# Altium footprint library SamacSys.PcbLib: 88 footprints (part 4 of 6)
Each footprint in its own frame and in the unit in brackets; x right, y up, seen from the top. Pads: shape width x height; smd on the part's side, far side on the other; paste and mask are expansions set on the pad; w line width, h text height; cw(c..) or ccw(c..) is an arc to the next point about the centre after c.
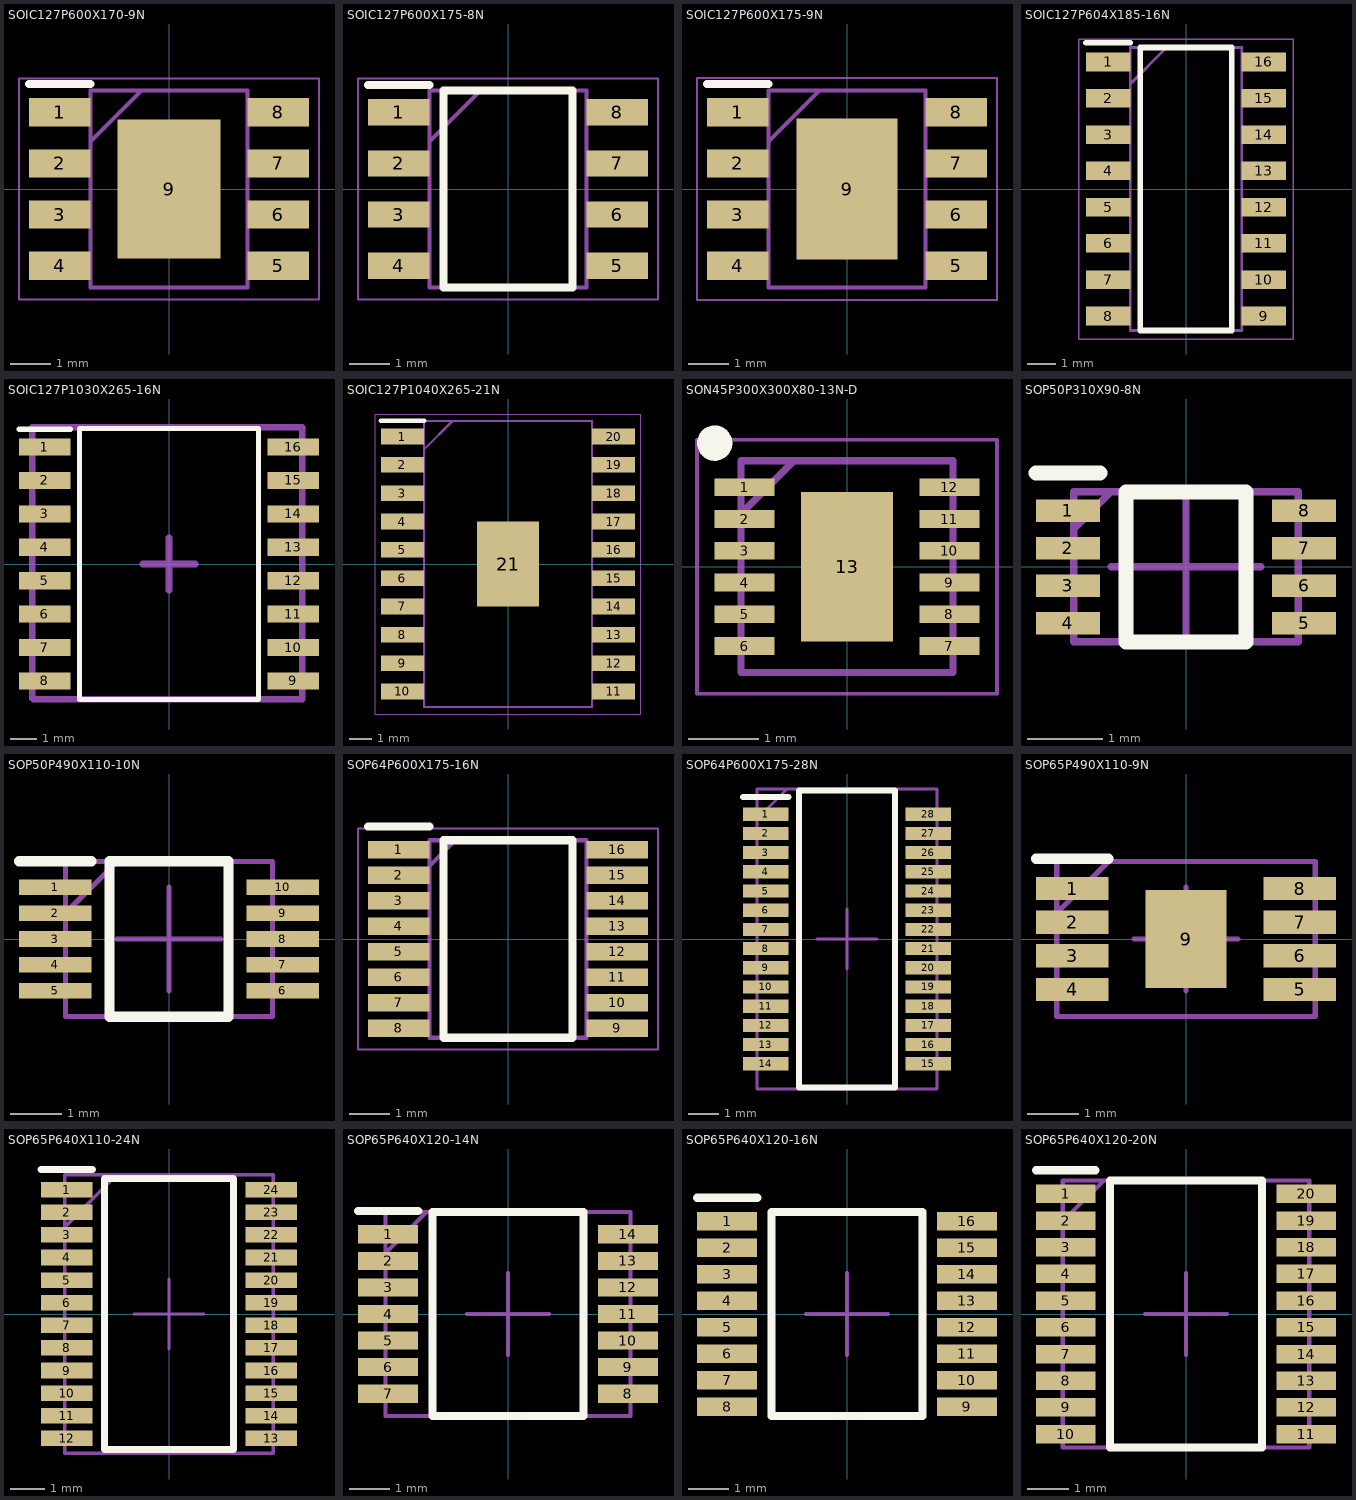
[diagram p3: the footprints below, top view; thin cyan lines are the x and y axes]

## SOIC127P600X170-9N [mm]
pads (9):
  rect 1.525x0.7 smd: 1(-2.712,1.905) 2(-2.712,0.635) 3(-2.712,-0.635) 4(-2.712,-1.905) 5(2.712,-1.905) 6(2.712,-0.635) 7(2.712,0.635) 8(2.712,1.905)
  rect 2.56x3.45 smd: 9(0,0)
Top Overlay:
  lines w0.2: -3.475,2.605 -1.95,2.605
Body Extra:
  lines w0.1: -1.95,1.18 -0.68,2.45 ; -1.95,-2.45 -1.95,2.45 1.95,2.45 1.95,-2.45 -1.95,-2.45
Bottom Courtyard:
  lines w0.05: -3.725,-2.75 -3.725,2.75 3.725,2.75 3.725,-2.75 -3.725,-2.75
  text ".Designator" at -1.143,-0.254 h1.52
3D body "MP1484EN-LF.stp": height 1.7, standoff 0, extent -3,-2.45 3,2.45

## SOIC127P600X175-8N [mm]
pads (8):
  rect 1.525x0.65 smd: 1(-2.712,1.905) 2(-2.712,0.635) 3(-2.712,-0.635) 4(-2.712,-1.905) 5(2.712,-1.905) 6(2.712,-0.635) 7(2.712,0.635) 8(2.712,1.905)
Top Overlay:
  lines w0.2: -3.475,2.58 -1.95,2.58 ; -1.6,-2.45 1.6,-2.45 1.6,2.45 -1.6,2.45 -1.6,-2.45
Body Extra:
  lines w0.1: -1.95,1.18 -0.68,2.45 ; -1.95,-2.45 1.95,-2.45 1.95,2.45 -1.95,2.45 -1.95,-2.45
Bottom Courtyard:
  lines w0.05: -3.725,-2.75 3.725,-2.75 3.725,2.75 -3.725,2.75 -3.725,-2.75
  text ".Designator" at -1.016,-0.381 h1.52
3D body "NE555DR.stp": height 1.75, standoff 0, extent -3,-2.45 3,2.45

## SOIC127P600X175-9N [mm]
pads (9):
  rect 1.522x0.7 smd: 1(-2.714,1.905) 2(-2.714,0.635) 3(-2.714,-0.635) 4(-2.714,-1.905) 5(2.714,-1.905) 6(2.714,-0.635) 7(2.714,0.635) 8(2.714,1.905)
  rect 2.5x3.5 smd: 9(0,0)
Top Overlay:
  lines w0.2: -3.475,2.605 -1.952,2.605
Top Component Outline:
  lines w0.1: -1.952,1.181 -0.682,2.451 ; -1.952,-2.451 -1.952,2.451 1.952,2.451 1.952,-2.451 -1.952,-2.451
Top Courtyard:
  lines w0.05: -3.725,-2.752 -3.725,2.752 3.725,2.752 3.725,-2.752 -3.725,-2.752
3D body "RT7258GSP.stp": height 1.75, standoff 0, extent -2.998,-2.451 2.998,2.451

## SOIC127P604X185-16N [mm]
pads (16):
  rect 1.55x0.65 smd: 1(-2.725,4.445) 2(-2.725,3.175) 3(-2.725,1.905) 4(-2.725,0.635) 5(-2.725,-0.635) 6(-2.725,-1.905) 7(-2.725,-3.175) 8(-2.725,-4.445) 9(2.725,-4.445) 10(2.725,-3.175) 11(2.725,-1.905) 12(2.725,-0.635) 13(2.725,0.635) 14(2.725,1.905) 15(2.725,3.175) 16(2.725,4.445)
Top Overlay:
  lines w0.2: -3.5,5.12 -1.95,5.12 ; -1.6,-4.95 -1.6,4.95 1.6,4.95 1.6,-4.95 -1.6,-4.95
Body Extra:
  lines w0.1: -1.95,3.68 -0.68,4.95 ; -1.95,-4.95 -1.95,4.95 1.95,4.95 1.95,-4.95 -1.95,-4.95
Bottom Courtyard:
  lines w0.05: -3.75,-5.25 -3.75,5.25 3.75,5.25 3.75,-5.25 -3.75,-5.25
  text ".Designator" at -1.016,-0.254 h1.52
3D body "SL2.1A.stp": height 1.85, standoff 0, extent -3.02,-4.95 3.02,4.95

## SOIC127P1030X265-16N [mm]
pads (16):
  rect 1.95x0.65 smd: 1(-4.725,4.445) 2(-4.725,3.175) 3(-4.725,1.905) 4(-4.725,0.635) 5(-4.725,-0.635) 6(-4.725,-1.905) 7(-4.725,-3.175) 8(-4.725,-4.445) 9(4.725,-4.445) 10(4.725,-3.175) 11(4.725,-1.905) 12(4.725,-0.635) 13(4.725,0.635) 14(4.725,1.905) 15(4.725,3.175) 16(4.725,4.445)
Top Overlay:
  lines w0.2: -5.7,5.12 -3.75,5.12 ; -3.4,-5.15 3.4,-5.15 3.4,5.15 -3.4,5.15 -3.4,-5.15
Top Component Outline:
  lines w0.254: -5.2,-5.1 -5.158,-5.142 5.058,-5.142 5.058,5.2 -5.2,5.2 -5.2,-5.1
Top Component Center:
  lines w0.254: -1,0 1,0 ; 0,-1 0,1
Top Value:
  text "'.Comment'" at -3.4,-0.289 h1.52
Top Designator:
  text "'.Designator'" at -4.2,-0.234 h1.52
3D body "TCA9534DWT.stp": height 2.65, standoff 0, extent -5.15,-5.15 5.15,5.15

## SOIC127P1040X265-21N [mm]
pads (21):
  rect 1.94x0.7 smd: 1(-4.73,5.715) 2(-4.73,4.445) 3(-4.73,3.175) 4(-4.73,1.905) 5(-4.73,0.635) 6(-4.73,-0.635) 7(-4.73,-1.905) 8(-4.73,-3.175) 9(-4.73,-4.445) 10(-4.73,-5.715) 11(4.73,-5.715) 12(4.73,-4.445) 13(4.73,-3.175) 14(4.73,-1.905) 15(4.73,-0.635) 16(4.73,0.635) 17(4.73,1.905) 18(4.73,3.175) 19(4.73,4.445) 20(4.73,5.715)
  rect 2.79x3.81 smd: 21(0,0)
Top Overlay:
  lines w0.2: -5.7,6.415 -3.76,6.415
Body Extra:
  lines w0.1: -3.76,5.142 -2.49,6.412 ; -3.76,-6.412 -3.76,6.412 3.76,6.412 3.76,-6.412 -3.76,-6.412
Bottom Courtyard:
  lines w0.05: -5.95,-6.725 -5.95,6.725 5.95,6.725 5.95,-6.725 -5.95,-6.725
  text ".Designator" at -1.27,-0.381 h1.52
3D body "TPA6120A2DWP.stp": height 2.65, standoff 0, extent -5.202,-6.412 5.202,6.412

## SON45P300X300X80-13N-D [mm]
pads (13):
  rect 0.85x0.25 smd: 1(-1.45,1.125) 2(-1.45,0.675) 3(-1.45,0.225) 4(-1.45,-0.225) 5(-1.45,-0.675) 6(-1.45,-1.125) 7(1.45,-1.125) 8(1.45,-0.675) 9(1.45,-0.225) 10(1.45,0.225) 11(1.45,0.675) 12(1.45,1.125)
  rect 1.31x2.12 smd: 13(0,0)
Top Overlay:
  circle w0.25: c-1.875,1.75 r0.125
Body Extra:
  lines w0.1: -1.5,0.75 -0.75,1.5 ; -1.5,-1.5 -1.5,1.5 1.5,1.5 1.5,-1.5 -1.5,-1.5
Bottom Courtyard:
  lines w0.05: -2.125,-1.8 -2.125,1.8 2.125,1.8 2.125,-1.8 -2.125,-1.8
3D body "TPS65133DPDR.stp": height 0.8, standoff 0, extent -1.55,-1.5 1.55,1.5

## SOP50P310X90-8N [mm]
pads (8):
  rect 0.85x0.3 smd: 1(-1.575,0.75) 2(-1.575,0.25) 3(-1.575,-0.25) 4(-1.575,-0.75) 5(1.575,-0.75) 6(1.575,-0.25) 7(1.575,0.25) 8(1.575,0.75)
Top Overlay:
  lines w0.2: -2,1.25 -1.15,1.25 ; -0.8,-1 -0.8,1 0.8,1 0.8,-1 -0.8,-1
Top Component Outline:
  lines w0.1: -1.5,0.5 -1,1 ; -1.5,-1 1.5,-1 1.5,1 -1.5,1 -1.5,-1
Top Component Center:
  lines w0.1: -1,0 1,0 ; 0,-1 0,1
Top Value:
  text "'.Comment'" at -2.476,-0.342 h1.14
Top Designator:
  text "'.Designator'" at -3.648,-0.496 h1.27
3D body "TS5A3359DCUR.stp": height 0.9, standoff 0, extent -1.55,-1 1.55,1

## SOP50P490X110-10N [mm]
pads (10):
  rect 1.4x0.3 smd: 1(-2.2,1) 2(-2.2,0.5) 3(-2.2,0) 4(-2.2,-0.5) 5(-2.2,-1) 6(2.2,-1) 7(2.2,-0.5) 8(2.2,0) 9(2.2,0.5) 10(2.2,1)
Top Overlay:
  lines w0.2: -2.9,1.5 -1.5,1.5 ; -1.15,-1.5 1.15,-1.5 1.15,1.5 -1.15,1.5 -1.15,-1.5
Top Component Outline:
  lines w0.1: -2,0.5 -1,1.5 ; -2,-1.5 2,-1.5 2,1.5 -2,1.5 -2,-1.5
Top Component Center:
  lines w0.1: -1,0 1,0 ; 0,-1 0,1
Top Value:
  text "'.Comment'" at -2.476,-0.342 h1.14
Top Designator:
  text "'.Designator'" at -3.648,-0.496 h1.27
3D body "FSUSB42MUX.stp": height 1.1, standoff 0, extent -2.45,-1.5 2.45,1.5

## SOP64P600X175-16N [mm]
pads (16):
  rect 1.528x0.435 smd: 1(-2.711,2.222) 2(-2.711,1.588) 3(-2.711,0.952) 4(-2.711,0.318) 5(-2.711,-0.318) 6(-2.711,-0.952) 7(-2.711,-1.588) 8(-2.711,-2.222) 9(2.711,-2.222) 10(2.711,-1.588) 11(2.711,-0.952) 12(2.711,-0.318) 13(2.711,0.318) 14(2.711,0.952) 15(2.711,1.588) 16(2.711,2.222)
Top Overlay:
  lines w0.2: -3.475,2.79 -1.948,2.79 ; -1.598,-2.452 -1.598,2.452 1.598,2.452 1.598,-2.452 -1.598,-2.452
Body Extra:
  lines w0.1: -1.948,1.818 -1.312,2.452 ; -1.948,-2.452 -1.948,2.452 1.948,2.452 1.948,-2.452 -1.948,-2.452
Bottom Courtyard:
  lines w0.05: -3.725,-2.75 -3.725,2.75 3.725,2.75 3.725,-2.75 -3.725,-2.75
3D body "ISO7740DBQ.stp": height 1.75, standoff 0, extent -2.997,-2.452 2.997,2.452

## SOP64P600X175-28N [mm]
pads (28):
  rect 1.525x0.44 smd: 1(-2.712,4.16) 2(-2.712,3.52) 3(-2.712,2.88) 4(-2.712,2.24) 5(-2.712,1.6) 6(-2.712,0.96) 7(-2.712,0.32) 8(-2.712,-0.32) 9(-2.712,-0.96) 10(-2.712,-1.6) 11(-2.712,-2.24) 12(-2.712,-2.88) 13(-2.712,-3.52) 14(-2.712,-4.16) 15(2.712,-4.16) 16(2.712,-3.52) 17(2.712,-2.88) 18(2.712,-2.24) 19(2.712,-1.6) 20(2.712,-0.96) 21(2.712,-0.32) 22(2.712,0.32) 23(2.712,0.96) 24(2.712,1.6) 25(2.712,2.24) 26(2.712,2.88) 27(2.712,3.52) 28(2.712,4.16)
Top Overlay:
  lines w0.2: -3.475,4.73 -1.95,4.73 ; -1.6,-4.95 1.6,-4.95 1.6,4.95 -1.6,4.95 -1.6,-4.95
Top Component Outline:
  lines w0.1: -3,4 -2,5 ; -3,-5 -3,5 3,5 3,-5 -3,-5
Top Component Center:
  lines w0.1: -1,0 1,0 ; 0,-1 0,1
Top Value:
  text "'.Comment'" at -2.476,-0.342 h1.14
Top Designator:
  text "'.Designator'" at -3.648,-0.496 h1.27
3D body "FE1.1S.stp": height 1.75, standoff 0, extent -3,-4.95 3,4.95

## SOP65P490X110-9N [mm]
pads (9):
  rect 1.4x0.45 smd: 1(-2.2,0.975) 2(-2.2,0.325) 3(-2.2,-0.325) 4(-2.2,-0.975) 5(2.2,-0.975) 6(2.2,-0.325) 7(2.2,0.325) 8(2.2,0.975)
  rect 1.57x1.89 smd: 9(0,0)
Top Overlay:
  lines w0.2: -2.9,1.55 -1.5,1.55
Top Component Outline:
  lines w0.1: -2.5,0.5 -1.5,1.5 ; -2.5,-1.5 -2.5,1.5 2.5,1.5 2.5,-1.5 -2.5,-1.5
Top Component Center:
  lines w0.1: -1,0 1,0 ; 0,-1 0,1
Top Value:
  text "'.Comment'" at -2.476,-0.342 h1.14
Top Designator:
  text "'.Designator'" at -3.648,-0.496 h1.27
3D body "TPA6110A2DGN.stp": height 1.1, standoff 0, extent -2.45,-1.5 2.45,1.5

## SOP65P640X110-24N [mm]
pads (24):
  rect 1.475x0.45 smd: 1(-2.938,3.575) 2(-2.938,2.925) 3(-2.938,2.275) 4(-2.938,1.625) 5(-2.938,0.975) 6(-2.938,0.325) 7(-2.938,-0.325) 8(-2.938,-0.975) 9(-2.938,-1.625) 10(-2.938,-2.275) 11(-2.938,-2.925) 12(-2.938,-3.575) 13(2.938,-3.575) 14(2.938,-2.925) 15(2.938,-2.275) 16(2.938,-1.625) 17(2.938,-0.975) 18(2.938,-0.325) 19(2.938,0.325) 20(2.938,0.975) 21(2.938,1.625) 22(2.938,2.275) 23(2.938,2.925) 24(2.938,3.575)
Top Overlay:
  lines w0.2: -3.675,4.15 -2.2,4.15 ; -1.85,-3.9 -1.85,3.9 1.85,3.9 1.85,-3.9 -1.85,-3.9
Top Component Outline:
  lines w0.1: -3,2.5 -1.5,4 ; -3,-4 -3,4 3,4 3,-4 -3,-4
Top Component Center:
  lines w0.1: -1,0 1,0 ; 0,-1 0,1
Top Value:
  text "'.Comment'" at -2.476,-0.342 h1.14
Top Designator:
  text "'.Designator'" at -3.648,-0.496 h1.27
3D body "PCA9555APW,118.stp": height 1.1, standoff 0, extent -3.2,-3.9 3.2,3.9

## SOP65P640X120-14N [mm]
pads (14):
  rect 1.475x0.45 smd: 1(-2.938,1.95) 2(-2.938,1.3) 3(-2.938,0.65) 4(-2.938,0) 5(-2.938,-0.65) 6(-2.938,-1.3) 7(-2.938,-1.95) 8(2.938,-1.95) 9(2.938,-1.3) 10(2.938,-0.65) 11(2.938,0) 12(2.938,0.65) 13(2.938,1.3) 14(2.938,1.95)
Top Overlay:
  lines w0.2: -3.675,2.525 -2.2,2.525 ; -1.85,-2.5 1.85,-2.5 1.85,2.5 -1.85,2.5 -1.85,-2.5
Top Component Outline:
  lines w0.1: -3,1.5 -2,2.5 ; -3,-2.5 -3,2.5 3,2.5 3,-2.5 -3,-2.5
Top Component Center:
  lines w0.1: -1,0 1,0 ; 0,-1 0,1
Top Value:
  text "'.Comment'" at -2.476,-0.342 h1.14
Top Designator:
  text "'.Designator'" at -3.648,-0.496 h1.27
3D body "TPA6138A2PW.stp": height 1.2, standoff 0, extent -3.2,-2.5 3.2,2.5

## SOP65P640X120-16N [mm]
pads (16):
  rect 1.475x0.45 smd: 1(-2.938,2.275) 2(-2.938,1.625) 3(-2.938,0.975) 4(-2.938,0.325) 5(-2.938,-0.325) 6(-2.938,-0.975) 7(-2.938,-1.625) 8(-2.938,-2.275) 9(2.938,-2.275) 10(2.938,-1.625) 11(2.938,-0.975) 12(2.938,-0.325) 13(2.938,0.325) 14(2.938,0.975) 15(2.938,1.625) 16(2.938,2.275)
Top Overlay:
  lines w0.2: -3.675,2.85 -2.2,2.85 ; -1.85,-2.5 1.85,-2.5 1.85,2.5 -1.85,2.5 -1.85,-2.5
Top Component Center:
  lines w0.1: -1,0 1,0 ; 0,-1 0,1
Top Value:
  text "'.Comment'" at -2.476,-0.342 h1.14
Top Designator:
  text "'.Designator'" at -3.648,-0.496 h1.27
3D body "ADG708BRUZ.stp": height 1.2, standoff 0, extent -3.2,-2.5 3.2,2.5

## SOP65P640X120-20N [mm]
pads (20):
  rect 1.45x0.45 smd: 1(-2.925,2.925) 2(-2.925,2.275) 3(-2.925,1.625) 4(-2.925,0.975) 5(-2.925,0.325) 6(-2.925,-0.325) 7(-2.925,-0.975) 8(-2.925,-1.625) 9(-2.925,-2.275) 10(-2.925,-2.925) 11(2.925,-2.925) 12(2.925,-2.275) 13(2.925,-1.625) 14(2.925,-0.975) 15(2.925,-0.325) 16(2.925,0.325) 17(2.925,0.975) 18(2.925,1.625) 19(2.925,2.275) 20(2.925,2.925)
Top Overlay:
  lines w0.2: -3.65,3.5 -2.2,3.5 ; -1.85,-3.25 1.85,-3.25 1.85,3.25 -1.85,3.25 -1.85,-3.25
Top Component Outline:
  lines w0.1: -3,2.25 -2,3.25 ; -3,-3.25 3,-3.25 3,3.25 -3,3.25 -3,-3.25
Top Component Center:
  lines w0.1: -1,0 1,0 ; 0,-1 0,1
Top Value:
  text "'.Comment'" at -2.476,-0.342 h1.14
Top Designator:
  text "'.Designator'" at -3.648,-0.496 h1.27
3D body "N76E003AT20.stp": height 1.2, standoff 0, extent -3.2,-3.25 3.2,3.25